# Altium schematic symbol library Schlib1.SchLib: 16 symbols
Pins are listed as number, name and electrical type; pins without a type are passive.

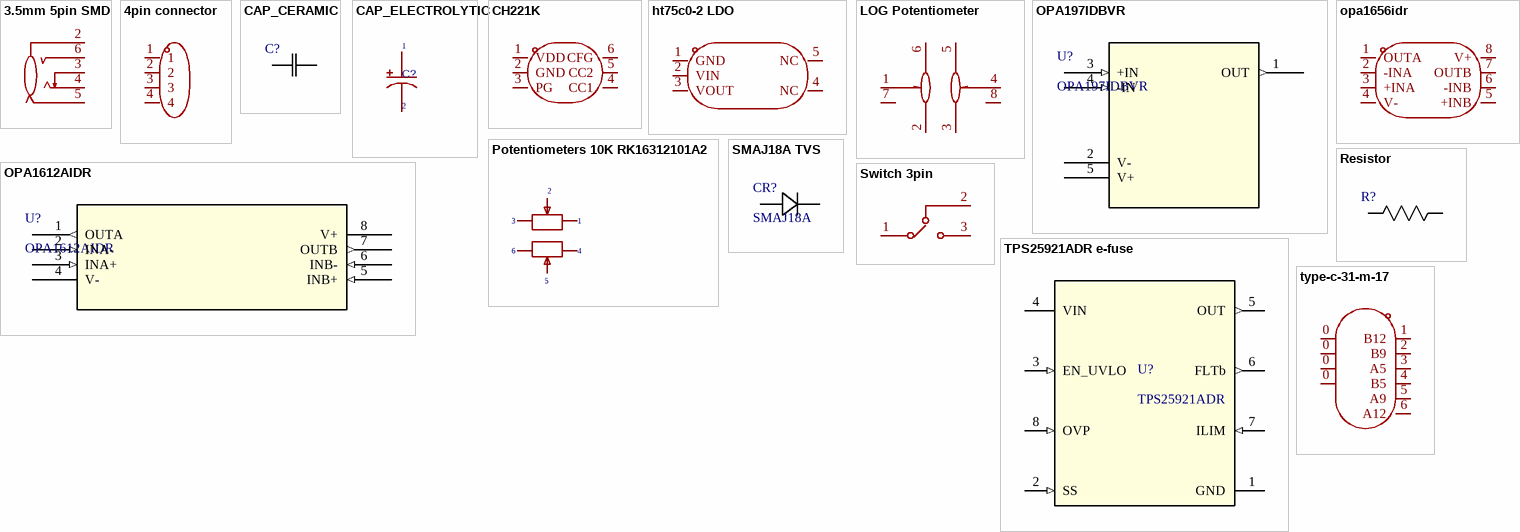
[diagram p0: symbols 3.5mm 5pin SMD to type-c-31-m-17]

## 3.5mm 5pin SMD
designator CN?, comment pj-327a_c49284723  (value not drawn)
Connector Type:3.5mm Headphone Jack Current Rating:500mA Voltage Rating (Max):30V Contact Material:Copper Contact Plating:Silver Operating Temperature:-25℃~+85℃ Operating Temperature:-25℃~+85℃ Rank Number:TRRS Mounting Style:Surface Mount Color:Black Body; Manufacturer: XUNPU(讯普); AddInBom: yes; ModelId: 28a3bb7a9e024b9f97707116e53a84e6; ModelName: AUDIO-SMD_XUNPU_PJ-327A; ModelTransform: 559.054,338.55094,0,0,0,0,-55.118,0,-25.591; Current Rating: 500mA; Voltage Rating (Max): 30V; Rank Number: TRRS; Body Height: 4.4mm; Symbol: PJ-327A; LCSC Part Name: 3.5mm耳机座; SupplierPart: C49284723; ManufacturerPart: PJ-327A; Supplier Footprint: SMD; JLCPCB Part Class: Extended Part; Datasheet: https://item.szlcsc.com/datasheet/PJ-327A/51736272.html; Supplier: LCSC; ConvertToPcb: yes; FootprintName: AUDIO-SMD_XUNPU_PJ-327A; Connector Type: 3.5mm Headphone Jack; Contact Material: Copper; Contact Plating: Silver; Operating Temperature: -25℃~+85℃; Mounting Style: Surface Mount; Color: Black; Length: 14.2mm; Width: 6mm
footprint 3.5mm 5pin SMD
pins: 2, 3, 4, 5, 6

## 4pin connector
designator H?, comment pz254r-11-04p  (value not drawn)
Pin Structure:1x4P Pitch:2.54mm Row Spacing:- Circluar Pins/Square Pins:Pin Header Mounting Type:Right Angle Number of Rows:1 Number of Pins:4P Current Rating:3A Voltage Rating (Max):250V Length of Mating Pin:6mm Insulation Height:2.5mm Length of End Conn; Manufacturer: XFCN(兴飞); AddInBom: yes; ModelId: 13284729e4054d7b9656609df5ff9409; ModelName: HDR-TH_4P-P2.54-M-WI-1X4P; ModelTransform: 399.999,417.322,0,180,0,0,0,-196.85,-118.11; Pin Structure: 1x4P; Pitch: 2.54mm; Current Rating: 3A; Voltage Rating (Max): 250V; Symbol: PZ254R-11-04P; LCSC Part Name: 1x4P 间距:2.54mm 方针 弯插; SupplierPart: C492412; ManufacturerPart: PZ254R-11-04P; Supplier Footprint: 弯插,P=2.54mm; JLCPCB Part Class: Extended Part; Datasheet: https://item.szlcsc.com/datasheet/PZ254R-11-04P/502968.html; Supplier: LCSC; ConvertToPcb: yes; FootprintName: HDR-TH_4P-P2.54-H-M-W10.4; Row Spacing: -; Circluar Pins/Square Pins: Pin Header; Mounting Type: Right Angle; Number of Rows: 1; Number of Pins: 4P; Length of Mating Pin: 6mm; Insulation Height: 2.5mm; Length of End Connection Pin: -; Contact Material: Brass; Contact Plating: -; Operating Temperature: -40℃~+105℃; Color: Black
footprint 4pin connector
pins: 1, 2, 3, 4

## CAP_CERAMIC
designator C?
Manufacturer_Name: Kemet; Manufacturer_Part_Number: C0603C104K5RACTU; Copyright: Copyright (C) 2026 Ultra Librarian. All rights reserved.
footprint 0603 Cap - C0G
footprint 0603 Cap - X7R
footprint 0805 CAP - C0G
footprint 1206 CAP C0G
footprint 1210 CAP
pins: 1, 2

## CAP_ELECTROLYTIC
designator C?
Tolerance:±20% Voltage Rating:25V Pin Spacing:5mm Diameter:12.5mm Height - Seated (Max):25mm Lifetime:2000hrs@105℃ Operating Temperature:-40℃~+105℃ Operating Temperature:-40℃~+105℃ Polarity type:Polarized; Manufacturer: Jianghai(南通江海); Symbol: ECR1EBK222MLL125025; AddInBom: yes; ModelId: bba5f7414a9d4a73a222d32de1544099; ModelName: CAP-TH_D12.5-H20.0-P5.00; ModelTransform: 492.5187,492.11201,0,0,0,0,0,0,-137.795; Value: 2200uF; Tolerance: ±20%; Voltage Rating: 25V; Pin Spacing: 5mm; LCSC Part Name: 2200uF ±20% 25V; SupplierPart: C233102; ManufacturerPart: ECR1EBK222MLL125025; Supplier Footprint: 插件; JLCPCB Part Class: Extended Part; Datasheet: https://item.szlcsc.com/datasheet/ECR1EBK222MLL125025/232937.html; Supplier: LCSC; ConvertToPcb: yes; FootprintName: CAP-TH_BD12.5-P5.00-D0.6-FD; Diameter: 12.5mm; Height - Seated (Max): 25mm; Lifetime: 2000hrs@105℃; Operating Temperature: -40℃~+105℃; Polarity type: Polarized
footprint ELC CAP D=5
pins: 1, 2

## CH221K
designator Q?, comment ch221k  (value not drawn)
100W PD3.2 / 100K请求15V; Manufacturer: WCH(南京沁恒); AddInBom: yes; ModelId: 838e09e61e8e47a1ac5306b7bfd21d61; ModelName: SOT-23-6_L2.9-W1.6-P0.95-LS2.8-BL-2; ModelTransform: 114.173,110.236,0,0,0,0,0,0,0; Type: Power Receiver Controller; Protocol: PD 3.0; Output Voltage: 5V；20V；15V；12V；9V; Symbol: CH221K; LCSC Part Name: USBPD多快充协议受电芯片; SupplierPart: C5125736; ManufacturerPart: CH221K; Supplier Footprint: SOT-23-6; JLCPCB Part Class: Extended Part; Datasheet: https://item.szlcsc.com/datasheet/CH221K/5724821.html; Supplier: LCSC; ConvertToPcb: yes; FootprintName: SOT-23-6_L2.9-W1.6-P0.95-LS2.8-BL-2; Number of Channels: -; Output Power: 100W; Voltage - Supply: -; Operating Temperature: -40℃~+105℃
footprint CH221K (SOT-23-6_L2.9-W1.6-P0.95-LS2.8-BL-2)
pins: 1 VDD, 2 GND, 3 PG, 4 CC1, 5 CC2, 6 CFG

## ht75c0-2 LDO
designator U?, comment ht75c0-2  (value not drawn)
Output Configuration:Positive Voltage - Supply:30V Output Voltage:12V Output Voltage:12V Output Current:150mA Power Supply Rejection Ratio (PSRR):- Voltage Dropout:25mV@(1mA) standby current:2.5uA Operating Temperature:-40℃~+85℃ Operating Temperature:-40℃; Manufacturer: HOLTEK(合泰/盛群); AddInBom: yes; ModelId: 3168b22659ce4998ae232d44bb704e0a; ModelName: SOT-23-5_L2.9-W1.6-H1.1-LS2.8-P0.95; ModelTransform: 114.173,109.636,0,180,0,0,0,0,0; Voltage - Supply: 30V; Output Voltage: 12V; Output Current: 150mA; standby current: 2.5uA; Output Type: Fixed; Number of Outputs: 1; Symbol: HT75C0-2; LCSC Part Name: 12V 150mA 30V; SupplierPart: C95005; ManufacturerPart: HT75C0-2; Supplier Footprint: SOT-23-5; JLCPCB Part Class: Extended Part; Supplier: LCSC; ConvertToPcb: yes; FootprintName: SOT-23-5_L3.0-W1.7-P0.95-LS2.8-BR; Output Configuration: Positive; Power Supply Rejection Ratio (PSRR): -; Voltage Dropout: 25mV@(1mA); Operating Temperature: -40℃~+85℃
footprint LDO
pins: 1 GND, 2 VIN, 3 VOUT, 4 NC, 5 NC

## LOG Potentiometer
designator U?, comment rk12l12c0a0e  (value not drawn)
Resistance: Tolerance:±20% Tolerance:±20% Rated Voltage: Power(Watts):50mW Turns:-; Manufacturer: ALPSALPINE(阿尔卑斯阿尔派); AddInBom: yes; ModelId: 34e0376d5eee43e6a3b83596b84c8b47; ModelName: RES-ADJ-TH_RK12L1230C1M; ModelTransform: 535.43082,681.101,0,0,0,0,-0.004,112.202,-145.669; Value: 10kΩ; Tolerance: ±20%; Power(Watts): 50mW; Symbol: RK12L12C0A0E; LCSC Part Name: 10kΩ ±20%; SupplierPart: C470285; ManufacturerPart: RK12L12C0A0E; Supplier Footprint: 插件-6P,15.5x12mm; JLCPCB Part Class: Extended Part; Datasheet: https://atta.szlcsc.com/upload/public/pdf/source/20191216/C470380_93C0132B2AE7BA8B014CE4021E4797E4.pdf; Supplier: LCSC; ConvertToPcb: yes; FootprintName: RES-ADJ-TH_RK12L1230C1M; Turns: -
footprint LOG Potentiometer
pins: 1, 2, 3, 4, 5, 6, 7 EH, 8 EH

## OPA197IDBVR
designator U?
Single, 36-V, precision, rail-to-rail input output, low offset voltage op amp 5-SOT-23 -40 to 125; Manufacturer_Name: Texas Instruments; Copyright: Copyright (C) 2026 Ultra Librarian. All rights reserved.; Manufacturer_Part_Number: OPA197IDBVR; RefDes: RefDes; Type: Type
footprint OPA197IDBVR
pins: 1 OUT (out), 2 V- (power), 3 +IN (in), 4 -IN (in), 5 V+ (power)

## OPA1612AIDR
designator U?
SoundPlusâ„¢ Audio Operational Amplifier with 1.1nV/âˆšHz Noise, Low THD and Precision 8-SOIC -40 to 85; Manufacturer_Name: Texas Instruments; Copyright: Copyright (C) 2025 Ultra Librarian. All rights reserved.; Manufacturer_Part_Number: OPA1612AIDR; RefDes: RefDes; Type: Type
footprint OPA1612AIDR
pins: 1 OUTA (out), 2 INA- (in), 3 INA+ (in), 4 V- (power), 5 INB+ (in), 6 INB- (in), 7 OUTB (out), 8 V+ (power)

## opa1656idr
designator U?  (value not drawn)
Number of Channels:2 Gain Bandwidth Product:53MHz Ib - Input Bias Current:20pA Vos - Input Offset Voltage:1mV Common Mode Rejection Ratio(CMRR):120dB Slew Rate:24V/us Quiescent Current(Iq):3.9mA Rail To Rail:Rail-to-rail output Input Offset Voltage Drift(; Manufacturer: TI(德州仪器); AddInBom: yes; ModelId: 2ec1ac1bf9bf4d09a988fcee15e6a02d; ModelName: SOIC-8_L4.9-W3.9-H1.7-LS6.0-P1.27; ModelTransform: 192.913,236.22,0,0,0,0,0,0,0; Number of Channels: 2; Gain Bandwidth Product: 53MHz; Ib - Input Bias Current: 20pA; Vos - Input Offset Voltage: 1mV; Common Mode Rejection Ratio(CMRR): 120dB; Slew Rate: 24V/us; Quiescent Current(Iq): 3.9mA; Input Offset Voltage Drift(Vos TC): 2uV/℃; Output Current: 100mA; Single Supply: 4.5V~36V; Dual Supply: -18V~-2.25V；2.25V~18V; Noise density(eN): 4.3nV/√Hz@1kHz; Symbol: OPA1656IDR; LCSC Part Name: 超低噪声、低失真、FET输入音频运算放大器; SupplierPart: C1849431; ManufacturerPart: OPA1656IDR; Supplier Footprint: SOIC-8; JLCPCB Part Class: Extended Part; Datasheet: https://www.ti.com/cn/lit/ds/symlink/opa1656.pdf; Supplier: LCSC; ConvertToPcb: yes; FootprintName: SOIC-8_L4.9-W3.9-P1.27-LS6.0-BL; Rail To Rail: Rail-to-rail output; Operating Temperature: -40℃~+125℃; Input Offset Current(Ios): 20pA
footprint OPA1656IDR
pins: 1 OUTA, 2 -INA, 3 +INA, 4 V-, 5 +INB, 6 -INB, 7 OUTB, 8 V+

## Potentiometers 10K RK16312101A2
designator R?, comment 10K  (value not drawn)
Resistance: 10K Tolerance:±20% Tolerance:±20% Rated Voltage:- Power(Watts):- Turns:; Manufacturer: ALPSALPINE(阿尔卑斯阿尔派); Symbol: RK16312101A2; AddInBom: yes; ModelId: 92b7132f4c3c4015aff86e677bf882d2; ModelName: RES-ADJ-TH_RK16312A0BKR; ModelTransform: 1066.927,708.66,0,0,0,0,326.772,0,-137.795; Value: 10kΩ; Tolerance: ±20%; LCSC Part Name: 10kΩ ±20% 三件套; SupplierPart: C470593; ManufacturerPart: RK16312101A2; Supplier Footprint: 插件-6P; JLCPCB Part Class: Extended Part; Datasheet: https://atta.szlcsc.com/upload/public/pdf/source/20191216/C470593_7E935C2EB9A734DEAF0A292D32EDD773.pdf; Supplier: LCSC; ConvertToPcb: yes; FootprintName: RES-ADJ-TH_RK16312A0BKR; Rated Voltage: -; Power(Watts): -
footprint Potentiometers 10K RK16312101A2 (10K)
pins: 1, 2, 3, 4, 5, 6

## Resistor
designator R?
Manufacturer_Name: Vishay; Manufacturer_Part_Number: CRCW060310K0FKEA; Copyright: Copyright (C) 2025 Ultra Librarian. All rights reserved.
footprint 0603 RES
footprint 0805 RES
pins: 1, 2

## SMAJ18A TVS
designator CR?, comment SMAJ18A
Description; Manufacturer_Name: Bourns Electronics; Copyright: Copyright (C) 2026 Ultra Librarian. All rights reserved.; Manufacturer_Part_Number: SMAJ18A
footprint TVS diode (Vrwm = 18V)
pins: 1, 2

## Switch 3pin
designator SW?, comment 2ms3t4b1m1qes-5  (value not drawn)
Circuit:SPDT Length:8.13mm Width:5.08mm Switch Height:26.93mm Life:30,000 Cycles Current Rating:3A Voltage Rating (AC):120V Voltage Rating (DC):28V Actuator Type:Cylinder Lever Termination Style:PC Pin Mounting Type:Through Hole Operating Temperature:-30℃; Manufacturer: Dailywell(德利威); AddInBom: yes; ModelId: 47a8f6d8042042bbb8e959a7e8d98b36; ModelName: SW-TH_2MS3T4B1M1QES-5; ModelTransform: 236.22,320.0781,0,0,0,0,0,0,-157.48; Circuit: SPDT; Current Rating: 3A; Voltage Rating (AC): 120V; Voltage Rating (DC): 28V; Symbol: 2MS3T4B1M1QES-5; LCSC Part Name: 三件套 开关 3件套; SupplierPart: C1122353; ManufacturerPart: 2MS3T4B1M1QES-5; Supplier Footprint: 插件,8.1x5.1mm; JLCPCB Part Class: Extended Part; Datasheet: https://item.szlcsc.com/datasheet/2MS3T4B1M1QES-5/1212718.html; Supplier: LCSC; ConvertToPcb: yes; FootprintName: SW-TH_2MS3T4B1M1QES-5; Length: 8.13mm; Width: 5.08mm; Switch Height: 26.93mm; Life: 30,000 Cycles; Actuator Type: Cylinder Lever; Termination Style: PC Pin; Mounting Type: Through Hole; Operating Temperature: -30℃~+85℃
footprint Switch 3pin
pins: 1, 2, 3

## TPS25921ADR e-fuse
designator U?, comment TPS25921ADR
4.5-V to 18-V, 90mÎ©, 0.4-1.6A eFuse with auto retry fault response 8-SOIC -40 to 85; Manufacturer_Name: Texas Instruments; CompType: IC; TYPE: TYPE; RefDes: RefDes; Copyright: Copyright (C) 2026 Ultra Librarian. All rights reserved.; Manufacturer_Part_Number: TPS25921ADR; PartNumber: TPS25921AD; PackageReference: D0008A; MountType: SMT; RoHS: Y; Manufacturer: Texas Instruments
footprint TPS25921ADR e-fuse
pins: 1 GND (power), 2 SS (in), 3 EN_UVLO (in), 4 VIN (power), 5 OUT (out), 6 FLTb (out), 7 ILIM (in), 8 OVP (in)

## type-c-31-m-17
designator USB?  (value not drawn)
Connector Type:Type-C Protocol Standard:- Gender:Female Mounting Type:Surface Mount, Right Angle Number of Contacts:6P Number of Ports:1 Current Rating-Power:5A Voltage Rating:20V Connect-Disconnect Life:3,000 Cycles Length:6.8mm Operating Temperature:-30; Manufacturer: 韩国韩荣; AddInBom: yes; ModelId: ab6076bf4dcb42b58b12fcacb7ccdaa0; ModelName: TYPE-C-SMD_6P-L8.9-W6.8-H3.2-P1.00; ModelTransform: 351.9678,267.716,0,180,0,0,-0.001,-47.957,-39.37; Connector Type: Type-C; Gender: Female; Number of Contacts: 6P; Number of Ports: 1; Current Rating-Power: 5A; Voltage Rating: 20V; Symbol: TYPE-C-31-M-17; Supplier: LCSC; Supplier Part: C283540; Manufacturer Part: TYPE-C-31-M-17; JLCPCB Part Class: Extended Part; LCSC Part Name: Type-C 母 卧贴; Supplier Footprint: SMD; Datasheet: https://item.szlcsc.com/datasheet/TYPE-C-31-M-17/269351.html; ConvertToPcb: yes; FootprintName: USB-C-SMD_10P-P1.00-L6.8-W8.9; Protocol Standard: -; Mounting Type: Surface Mount, Right Angle; Connect-Disconnect Life: 3,000 Cycles; Length: 6.8mm; Operating Temperature: -30℃~+80℃
footprint USB-C-SMD_10P-P1.00-L6.8-W8.9
pins: 0, 0, 0, 0, 1 B12, 2 B9, 3 A5, 4 B5, 5 A9, 6 A12